# Altium footprint library STPMotorControl_1.PcbLib: 81 footprints (part 5 of 6)
Each footprint in its own frame and in the unit in brackets; x right, y up, seen from the top. Pads: shape width x height; smd on the part's side, far side on the other; paste and mask are expansions set on the pad; w line width, h text height; cw(c..) or ccw(c..) is an arc to the next point about the centre after c.
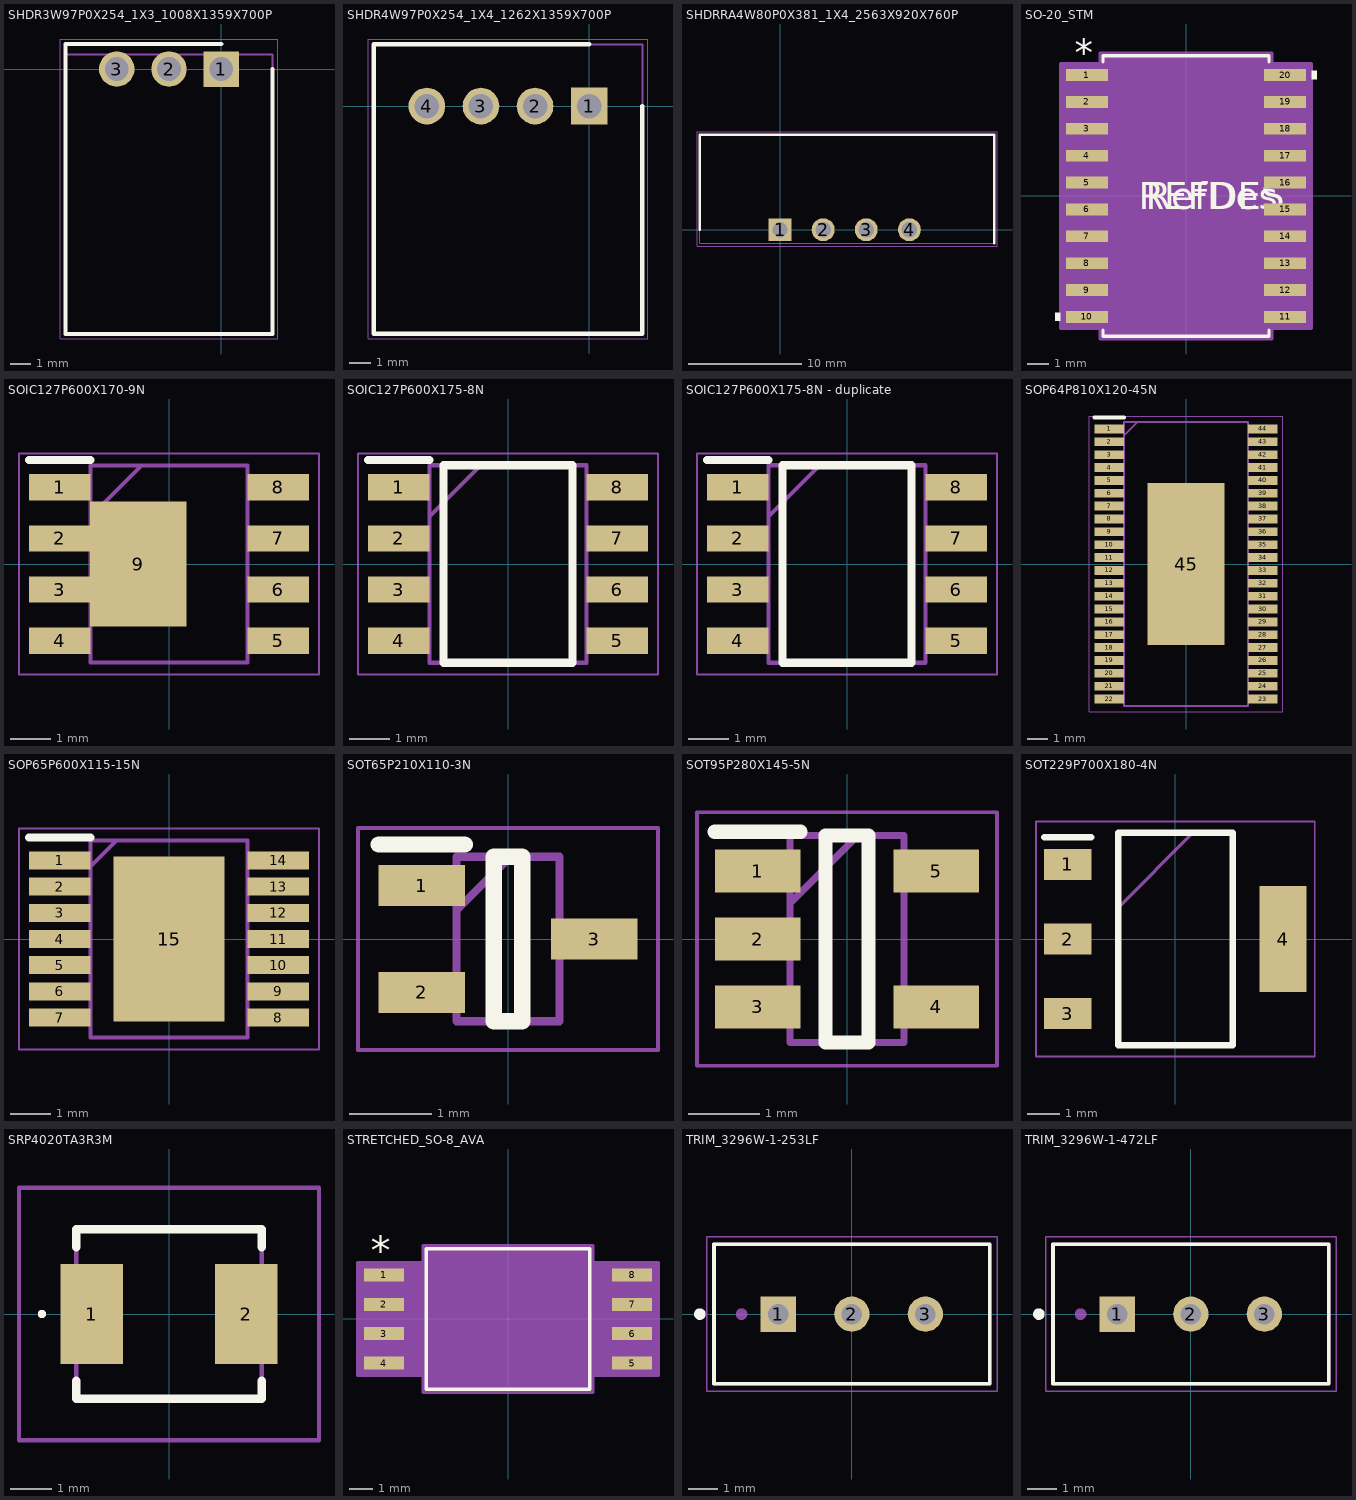
[diagram p4: the footprints below, top view; thin cyan lines are the x and y axes]

## SHDR3W97P0X254_1X3_1008X1359X700P [mm]
pads (3):
  rect 1.725x1.725 hole 1.15: 1(0,0)
  round 1.725 hole 1.15: 2(-2.54,0) 3(-5.08,0)
Top Overlay:
  lines w0.2: 0,1.212 -7.58,1.212 -7.58,-12.88 2.5,-12.88 2.5,0
Mechanical 13:
  lines w0.1: -7.58,-12.88 -7.58,0.71 2.5,0.71 2.5,-12.88 -7.58,-12.88
Mechanical 15:
  lines w0.05: -7.83,-13.13 -7.83,1.462 2.75,1.462 2.75,-13.13 -7.83,-13.13
3D body "171974-0003.stp": height 7.35, standoff -3.32, extent -7.58,-12.63 2.5,0.96

## SHDR4W97P0X254_1X4_1262X1359X700P [mm]
pads (4):
  rect 1.725x1.725 hole 1.15: 1(0,0)
  round 1.725 hole 1.15: 2(-2.54,0) 3(-5.08,0) 4(-7.62,0)
Top Overlay:
  lines w0.2: 0,2.9 -10.12,2.9 -10.12,-10.69 2.5,-10.69 2.5,0
Mechanical 13:
  lines w0.1: -10.12,-10.69 -10.12,2.9 2.5,2.9 2.5,-10.69 -10.12,-10.69
Mechanical 15:
  lines w0.05: -10.37,-10.94 -10.37,3.15 2.75,3.15 2.75,-10.94 -10.37,-10.94
3D body "171974-0004.stp": height 7.19, standoff -3.48, extent -10.12,-10.669 2.5,2.921

## SHDRRA4W80P0X381_1X4_2563X920X760P [mm]
pads (4):
  rect 2.025x2.025 / inner round 2.025 / far side rect 2.025x2.025 hole 1.35: 1(0,0)
  round 2.025 hole 1.35: 2(3.81,0) 3(7.62,0) 4(11.43,0)
Top Overlay:
  lines w0.2: -7.1,0 -7.1,8.4 18.93,8.4 18.93,-1.2
Mechanical 15:
  lines w0.1: -7.1,-1.2 18.93,-1.2 18.93,8.4 -7.1,8.4 -7.1,-1.2
Mechanical 20:
  lines w0.05: -7.35,-1.45 -7.35,8.65 19.18,8.65 19.18,-1.45 -7.35,-1.45
3D body "TBP02R1W-381-04BE.stp": height 7.65, standoff -3.05, extent -7.1,-1.27 18.53,7.93

## SO-20_STM [mil]
pads (20):
  rect 78x22 smd paste+0 mask+0: 1(-184.5,225) 2(-184.5,175) 3(-184.5,125) 4(-184.5,75) 5(-184.5,25) 6(-184.5,-25) 7(-184.5,-75) 8(-184.5,-125) 9(-184.5,-175) 10(-184.5,-225) 11(184.5,-225) 12(184.5,-175) 13(184.5,-125) 14(184.5,-75) 15(184.5,-25) 16(184.5,25) 17(184.5,75) 18(184.5,125) 19(184.5,175) 20(184.5,225)
Top Overlay:
  region: -233.5,-217.5 -243.5,-217.5 -243.5,-232.5 -233.5,-232.5
  region: 233.5,232.5 243.5,232.5 243.5,217.5 233.5,217.5
  lines w6: -154.5,-249.1 -154.5,-261 154.5,-261 154.5,-249.1 ; -154.5,249.1 -154.5,261 154.5,261 154.5,249.1
  text "*" at -207,242 h50
  text "RefDes" at -75,-25 h50
  text "REFDES" at -87.5,-25 h50
Mechanical 13:
  lines w0: -12,256 ccw(c0,256) 12,256
  lines w1: -209.5,-235 -209.5,-215 -149.5,-215 -149.5,-235 -209.5,-235 ; -209.5,-185 -209.5,-165 -149.5,-165 -149.5,-185 -209.5,-185 ; -209.5,-135 -209.5,-115 -149.5,-115 -149.5,-135 -209.5,-135 ; -209.5,-85 -209.5,-65 -149.5,-65 -149.5,-85 -209.5,-85 ; -209.5,-35 -209.5,-15 -149.5,-15 -149.5,-35 -209.5,-35 ; -209.5,15 -209.5,35 -149.5,35 -149.5,15 -209.5,15 ; -209.5,65 -209.5,85 -149.5,85 -149.5,65 -209.5,65 ; -209.5,115 -209.5,135 -149.5,135 -149.5,115 -209.5,115 ; -209.5,165 -209.5,185 -149.5,185 -149.5,165 -209.5,165 ; -209.5,215 -209.5,235 -149.5,235 -149.5,215 -209.5,215 ; -149.5,-256 149.5,-256 149.5,256 -149.5,256 -149.5,-256 ; 149.5,-235 149.5,-215 209.5,-215 209.5,-235 149.5,-235 ; 149.5,-185 149.5,-165 209.5,-165 209.5,-185 149.5,-185 ; 149.5,-135 149.5,-115 209.5,-115 209.5,-135 149.5,-135 ; 149.5,-85 149.5,-65 209.5,-65 209.5,-85 149.5,-85 ; 149.5,-35 149.5,-15 209.5,-15 209.5,-35 149.5,-35 ; 149.5,15 149.5,35 209.5,35 209.5,15 149.5,15 ; 149.5,65 149.5,85 209.5,85 209.5,65 149.5,65 ; 149.5,115 149.5,135 209.5,135 209.5,115 149.5,115 ; 149.5,165 149.5,185 209.5,185 209.5,165 149.5,165 ; 149.5,215 149.5,235 209.5,235 209.5,215 149.5,215
  text "*" at -147,203 h50
  text "RefDes2" at -87.5,-25 h50
Mechanical 15:
  region: -159.5,-246 -233.5,-246 -233.5,246 -159.5,246 -159.5,266 159.5,266 159.5,246 233.5,246 233.5,-246 159.5,-246 159.5,-266 -159.5,-266
  lines w6: -233.5,-246 -233.5,246 -159.5,246 -159.5,266 159.5,266 159.5,246 233.5,246 233.5,-246 159.5,-246 159.5,-266 -159.5,-266 -159.5,-246 -233.5,-246
3D body "SO-20_STM.step": height 104.09, standoff 0, extent -209.49,-255.98 209.49,255.98

## SOIC127P600X170-9N [mm]
pads (9):
  rect 1.525x0.65 smd: 1(-2.712,1.905) 2(-2.712,0.635) 3(-2.712,-0.635) 4(-2.712,-1.905) 5(2.712,-1.905) 6(2.712,-0.635) 7(2.712,0.635) 8(2.712,1.905)
  rect 2.4x3.1 smd: 9(-0.762,0)
Top Overlay:
  lines w0.2: -3.475,2.58 -1.95,2.58
Mechanical 15:
  lines w0.1: -1.95,1.18 -0.68,2.45 ; -1.95,-2.45 -1.95,2.45 1.95,2.45 1.95,-2.45 -1.95,-2.45
Mechanical 20:
  lines w0.05: -3.725,-2.75 -3.725,2.75 3.725,2.75 3.725,-2.75 -3.725,-2.75
3D body "LMR38020FSQDDARQ1.stp": height 1.57, standoff 0, extent -3,-2.45 3,2.45

## SOIC127P600X175-8N [mm]
pads (8):
  rect 1.528x0.65 smd: 1(-2.711,1.905) 2(-2.711,0.635) 3(-2.711,-0.635) 4(-2.711,-1.905) 5(2.711,-1.905) 6(2.711,-0.635) 7(2.711,0.635) 8(2.711,1.905)
Top Overlay:
  lines w0.2: -3.475,2.58 -1.948,2.58 ; -1.598,-2.452 -1.598,2.452 1.598,2.452 1.598,-2.452 -1.598,-2.452
Mechanical 15:
  lines w0.1: -1.948,1.182 -0.678,2.452 ; -1.948,-2.452 -1.948,2.452 1.948,2.452 1.948,-2.452 -1.948,-2.452
Mechanical 20:
  lines w0.05: -3.725,-2.75 -3.725,2.75 3.725,2.75 3.725,-2.75 -3.725,-2.75
3D body "TCAN1044AVDRQ1.stp": height 1.63, standoff 0, extent -3.138,-2.451 2.884,2.451

## SOIC127P600X175-8N - duplicate [mm]
pads (8):
  rect 1.528x0.65 smd: 1(-2.711,1.905) 2(-2.711,0.635) 3(-2.711,-0.635) 4(-2.711,-1.905) 5(2.711,-1.905) 6(2.711,-0.635) 7(2.711,0.635) 8(2.711,1.905)
Top Overlay:
  lines w0.2: -3.475,2.58 -1.948,2.58 ; -1.598,-2.452 1.598,-2.452 1.598,2.452 -1.598,2.452 -1.598,-2.452
Mechanical 13:
  lines w0.1: -1.948,1.182 -0.678,2.452 ; -1.948,-2.452 1.948,-2.452 1.948,2.452 -1.948,2.452 -1.948,-2.452
Mechanical 15:
  lines w0.05: -3.725,-2.75 3.725,-2.75 3.725,2.75 -3.725,2.75 -3.725,-2.75
3D body "TCAN3403DRQ1.stp": height 1.75, standoff 0, extent -3,-2.45 3,2.45

## SOP64P810X120-45N [mm]
pads (45):
  rect 1.475x0.435 smd: 1(-3.788,6.668) 2(-3.788,6.032) 3(-3.788,5.398) 4(-3.788,4.762) 5(-3.788,4.128) 6(-3.788,3.492) 7(-3.788,2.858) 8(-3.788,2.222) 9(-3.788,1.588) 10(-3.788,0.952) 11(-3.788,0.318) 12(-3.788,-0.318) 13(-3.788,-0.952) 14(-3.788,-1.588) 15(-3.788,-2.222) 16(-3.788,-2.858) 17(-3.788,-3.492) 18(-3.788,-4.128) 19(-3.788,-4.762) 20(-3.788,-5.398) 21(-3.788,-6.032) 22(-3.788,-6.668) 23(3.788,-6.668) 24(3.788,-6.032) 25(3.788,-5.398) 26(3.788,-4.762) 27(3.788,-4.128) 28(3.788,-3.492) 29(3.788,-2.858) 30(3.788,-2.222) 31(3.788,-1.588) 32(3.788,-0.952) 33(3.788,-0.318) 34(3.788,0.318) 35(3.788,0.952) 36(3.788,1.588) 37(3.788,2.222) 38(3.788,2.858) 39(3.788,3.492) 40(3.788,4.128) 41(3.788,4.762) 42(3.788,5.398) 43(3.788,6.032) 44(3.788,6.668)
  rect 3.8x8 smd: 45(0,0)
Top Overlay:
  lines w0.2: -4.525,7.235 -3.05,7.235
Mechanical 13:
  lines w0.1: -3.05,6.365 -2.415,7 ; -3.05,-7 -3.05,7 3.05,7 3.05,-7 -3.05,-7
Mechanical 15:
  lines w0.05: -4.775,-7.3 -4.775,7.3 4.775,7.3 4.775,-7.3 -4.775,-7.3
3D body "DRV8462DDWR.stp": height 1.2, standoff 0, extent -4.05,-7 4.05,7

## SOP65P600X115-15N [mm]
pads (15):
  rect 1.525x0.45 smd: 1(-2.712,1.95) 2(-2.712,1.3) 3(-2.712,0.65) 4(-2.712,0) 5(-2.712,-0.65) 6(-2.712,-1.3) 7(-2.712,-1.95) 8(2.712,-1.95) 9(2.712,-1.3) 10(2.712,-0.65) 11(2.712,0) 12(2.712,0.65) 13(2.712,1.3) 14(2.712,1.95)
  rect 2.75x4.1 smd: 15(0,0)
Top Overlay:
  lines w0.2: -3.475,2.525 -1.95,2.525
Mechanical 15:
  lines w0.1: -1.95,1.8 -1.3,2.45 ; -1.95,-2.45 -1.95,2.45 1.95,2.45 1.95,-2.45 -1.95,-2.45
Mechanical 20:
  lines w0.05: -3.725,-2.75 -3.725,2.75 3.725,2.75 3.725,-2.75 -3.725,-2.75
3D body "BTS70902EPLXUMA1.stp": height 1.18, standoff 0.04, extent -3.115,-2.415 2.885,2.485

## SOT65P210X110-3N [mm]
pads (3):
  rect 1.05x0.5 smd: 1(-1.05,0.65) 2(-1.05,-0.65) 3(1.05,0)
Top Overlay:
  lines w0.2: -1.575,1.15 -0.525,1.15 ; -0.175,-1 0.175,-1 0.175,1 -0.175,1 -0.175,-1
Mechanical 13:
  lines w0.1: -0.625,0.35 0.025,1 ; -0.625,-1 0.625,-1 0.625,1 -0.625,1 -0.625,-1
Mechanical 15:
  lines w0.05: -1.825,-1.35 1.825,-1.35 1.825,1.35 -1.825,1.35 -1.825,-1.35
3D body "ESDCAN03-2BWY.stp": height 1.1, standoff 0, extent -1.05,-1 1.05,1

## SOT95P280X145-5N [mm]
pads (5):
  rect 1.2x0.6 smd: 1(-1.25,0.95) 2(-1.25,0) 3(-1.25,-0.95) 4(1.25,-0.95) 5(1.25,0.95)
Top Overlay:
  lines w0.2: -1.85,1.5 -0.65,1.5 ; -0.3,-1.45 0.3,-1.45 0.3,1.45 -0.3,1.45 -0.3,-1.45
Mechanical 15:
  lines w0.1: -0.8,0.5 0.15,1.45 ; -0.8,-1.45 0.8,-1.45 0.8,1.45 -0.8,1.45 -0.8,-1.45
Mechanical 20:
  lines w0.05: -2.1,-1.775 2.1,-1.775 2.1,1.775 -2.1,1.775 -2.1,-1.775
3D body "TLV75533PDBVR.stp": height 1.19, standoff -0.01, extent -1.4,-1.45 1.4,1.45

## SOT229P700X180-4N [mm]
pads (4):
  rect 1.45x0.95 smd: 1(-3.3,2.29) 2(-3.3,0) 3(-3.3,-2.29)
  rect 1.45x3.25 smd: 4(3.3,0)
Top Overlay:
  lines w0.2: -4.025,3.115 -2.575,3.115 ; -1.752,-3.252 -1.752,3.252 1.752,3.252 1.752,-3.252 -1.752,-3.252
Mechanical 13:
  lines w0.1: -1.752,0.962 0.538,3.252 ; -1.752,-3.252 -1.752,3.252 1.752,3.252 1.752,-3.252 -1.752,-3.252
Mechanical 15:
  lines w0.05: -4.275,-3.605 -4.275,3.605 4.275,3.605 4.275,-3.605 -4.275,-3.605
3D body "AMS1117-3.3.stp": height 1.8, standoff 0, extent -3.355,-3.15 3.355,3.15

## SRP4020TA3R3M [mm]
pads (2):
  rect 1.5x2.4 smd: 1(-1.85,0) 2(1.85,0)
Top Overlay:
  lines w0.1: -3.1,0 cw(c-3.05,0) -3,0 cw(c-3.05,0) -3.1,0
  lines w0.2: -2.225,-1.6 -2.225,-2.03 2.225,-2.03 2.225,-1.6 ; -2.225,1.6 -2.225,2.03 2.225,2.03 2.225,1.6
Mechanical 13:
  lines w0.1: -2.225,-2.03 2.225,-2.03 2.225,2.03 -2.225,2.03 -2.225,-2.03
Mechanical 15:
  lines w0.1: -3.6,-3.03 3.6,-3.03 3.6,3.03 -3.6,3.03 -3.6,-3.03
3D body "SRP4020TA-3R3M.stp": height 1.77, standoff 0, extent -2.225,-2.03 2.225,2.03

## STRETCHED_SO-8_AVA [mil]
pads (8):
  rect 68x22 smd paste+0 mask+0: 1(-211.5,75) 2(-211.5,25) 3(-211.5,-25) 4(-211.5,-75) 5(211.5,-75) 6(211.5,-25) 7(211.5,25) 8(211.5,75)
Top Overlay:
  lines w6: -139,-120 -139,120 139,120 139,-120 -139,-120
  text "*" at -234,92 h50
  text ".Designator" at -137.5,-25 h50
Mechanical 13:
  lines w1: -12,115 ccw(c0,115) 12,115 ; -231.5,-85 -134,-85 -134,-65 -231.5,-65 -231.5,-85 ; -231.5,-35 -134,-35 -134,-15 -231.5,-15 -231.5,-35 ; -231.5,15 -134,15 -134,35 -231.5,35 -231.5,15 ; -231.5,65 -134,65 -134,85 -231.5,85 -231.5,65 ; -134,-115 -134,115 134,115 134,-115 -134,-115 ; 134,-85 231.5,-85 231.5,-65 134,-65 134,-85 ; 134,-35 231.5,-35 231.5,-15 134,-15 134,-35 ; 134,15 231.5,15 231.5,35 134,35 134,15 ; 134,65 231.5,65 231.5,85 134,85 134,65
  text ".Designator" at -137.5,-25 h50
  text "*" at -131.5,62 h50
Mechanical 15:
  region: -144,-96 -255.5,-96 -255.5,96 -144,96 -144,125 144,125 144,96 255.5,96 255.5,-96 144,-96 144,-125 -144,-125
  lines w6: -255.5,-96 -144,-96 -144,-125 144,-125 144,-96 255.5,-96 255.5,96 144,96 144,125 -144,125 -144,96 -255.5,96 -255.5,-96
3D body "STRETCHED_SO-8_AVA.step": height 130.12, standoff 0, extent -231.5,-115 231.5,115

## TRIM_3296W-1-253LF [mm]
pads (3):
  rect 1.218x1.218 / inner round 1.218 / far side rect 1.218x1.218 hole 0.71 mask+0.102: 1(-2.54,0)
  round 1.218 hole 0.71 mask+0.102: 2(0,0) 3(2.54,0)
Top Overlay:
  circle w0.2: c-5.25,0 r0.1
  lines w0.127: -4.765,-2.41 4.765,-2.41 4.765,2.42 -4.765,2.42 -4.765,-2.41
Mechanical 13:
  circle w0.2: c-3.81,0 r0.1
  lines w0.127: -4.765,-2.41 -4.765,2.42 4.765,2.42 4.765,-2.41 -4.765,-2.41
Mechanical 15:
  lines w0.05: -5.015,-2.66 -5.015,2.67 5.015,2.67 5.015,-2.66 -5.015,-2.66
3D body "step_temp.STEP": height 11.55, standoff -7.72, extent -4.765,-2.41 4.765,2.42

## TRIM_3296W-1-472LF [mm]
pads (3):
  rect 1.218x1.218 / inner round 1.218 / far side rect 1.218x1.218 hole 0.71 mask+0.102: 1(-2.54,0)
  round 1.218 hole 0.71 mask+0.102: 2(0,0) 3(2.54,0)
Top Overlay:
  circle w0.2: c-5.25,0 r0.1
  lines w0.127: -4.765,-2.41 -4.765,2.42 4.765,2.42 4.765,-2.41 -4.765,-2.41
Mechanical 13:
  circle w0.2: c-3.81,0 r0.1
  lines w0.127: -4.765,-2.41 4.765,-2.41 4.765,2.42 -4.765,2.42 -4.765,-2.41
Mechanical 15:
  lines w0.05: -5.015,-2.66 5.015,-2.66 5.015,2.67 -5.015,2.67 -5.015,-2.66
3D body "step_temp.STEP": height 11.55, standoff -7.72, extent -4.765,-2.41 4.765,2.42